# Altium schematic symbol library TLV9044IPWR.SchLib: 1 symbol
Pins are listed as number, name and electrical type; pins without a type are passive.

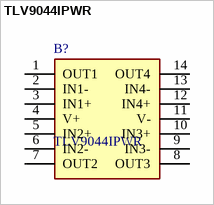
[diagram p0: symbol TLV9044IPWR]

## TLV9044IPWR
designator B?
1.2-V ultra-low voltage, 350-kHz-power saving quad op amp for battery powered systems; Manufacturer_Name: Texas Instruments; Geometry.Height: 1.2mm; Mouser Part Number: 595-TLV9044IPWR; Mouser Price/Stock: https://www.mouser.co.uk/ProductDetail/Texas-Instruments/TLV9044IPWR?qs=eP2BKZSCXI4jXdLHrt%252BknA%3D%3D; Manufacturer_Part_Number: TLV9044IPWR; Datasheet Link: https://www.ti.com/lit/ds/symlink/tlv9044.pdf?ts=1630832764270&ref_url=https%253A%252F%252Fwww.ti.com%252Fproduct%252FTLV9044%253FkeyMatch%253DTLV9044IPWR%2526tisearch%253Dsearch-everything%2526usecase%253DOPN
footprint SOP65P640X120-14N
pins: 1 OUT1, 2 IN1-, 3 IN1+, 4 V+, 5 IN2+, 6 IN2-, 7 OUT2, 8 OUT3, 9 IN3-, 10 IN3+, 11 V-, 12 IN4+, 13 IN4-, 14 OUT4